# Altium footprint library NetTie.PcbLib: 1 footprints
Each footprint in its own frame and in the unit in brackets; x right, y up, seen from the top. Pads: shape width x height; smd on the part's side, far side on the other; paste and mask are expansions set on the pad; w line width, h text height; cw(c..) or ccw(c..) is an arc to the next point about the centre after c.
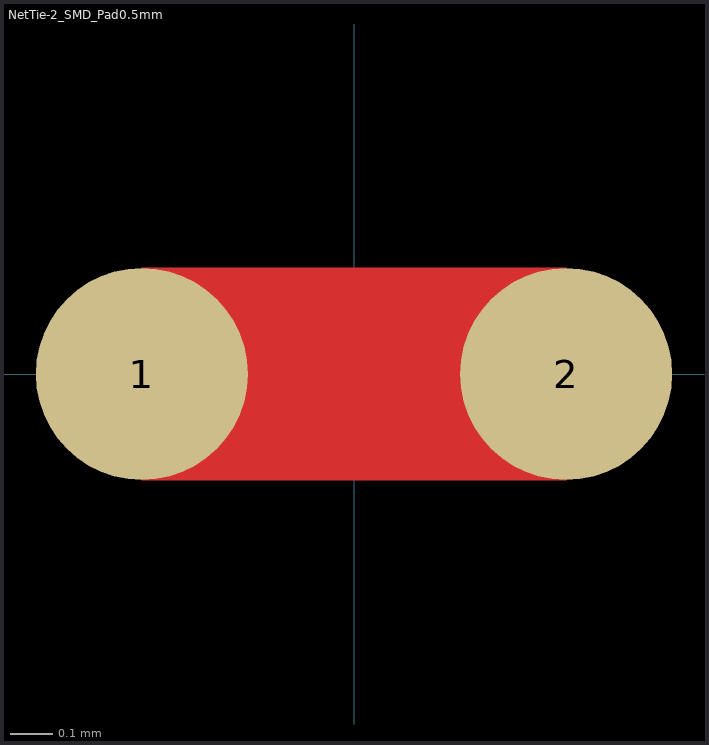
[diagram p0: the footprint, top view; thin cyan lines are the x and y axes]

## NetTie-2_SMD_Pad0.5mm [mm]
pads (2):
  round 0.5 smd: 1(-0.5,0) 2(0.5,0)
F.Cu:
  region: 0.5,-0.25 -0.5,-0.25 -0.5,0.25 0.5,0.25